# Altium footprint library DIM.PcbLib: 183 footprints (part 1 of 12)
Each footprint in its own frame and in the unit in brackets; x right, y up, seen from the top. Pads: shape width x height; smd on the part's side, far side on the other; paste and mask are expansions set on the pad; w line width, h text height; cw(c..) or ccw(c..) is an arc to the next point about the centre after c.
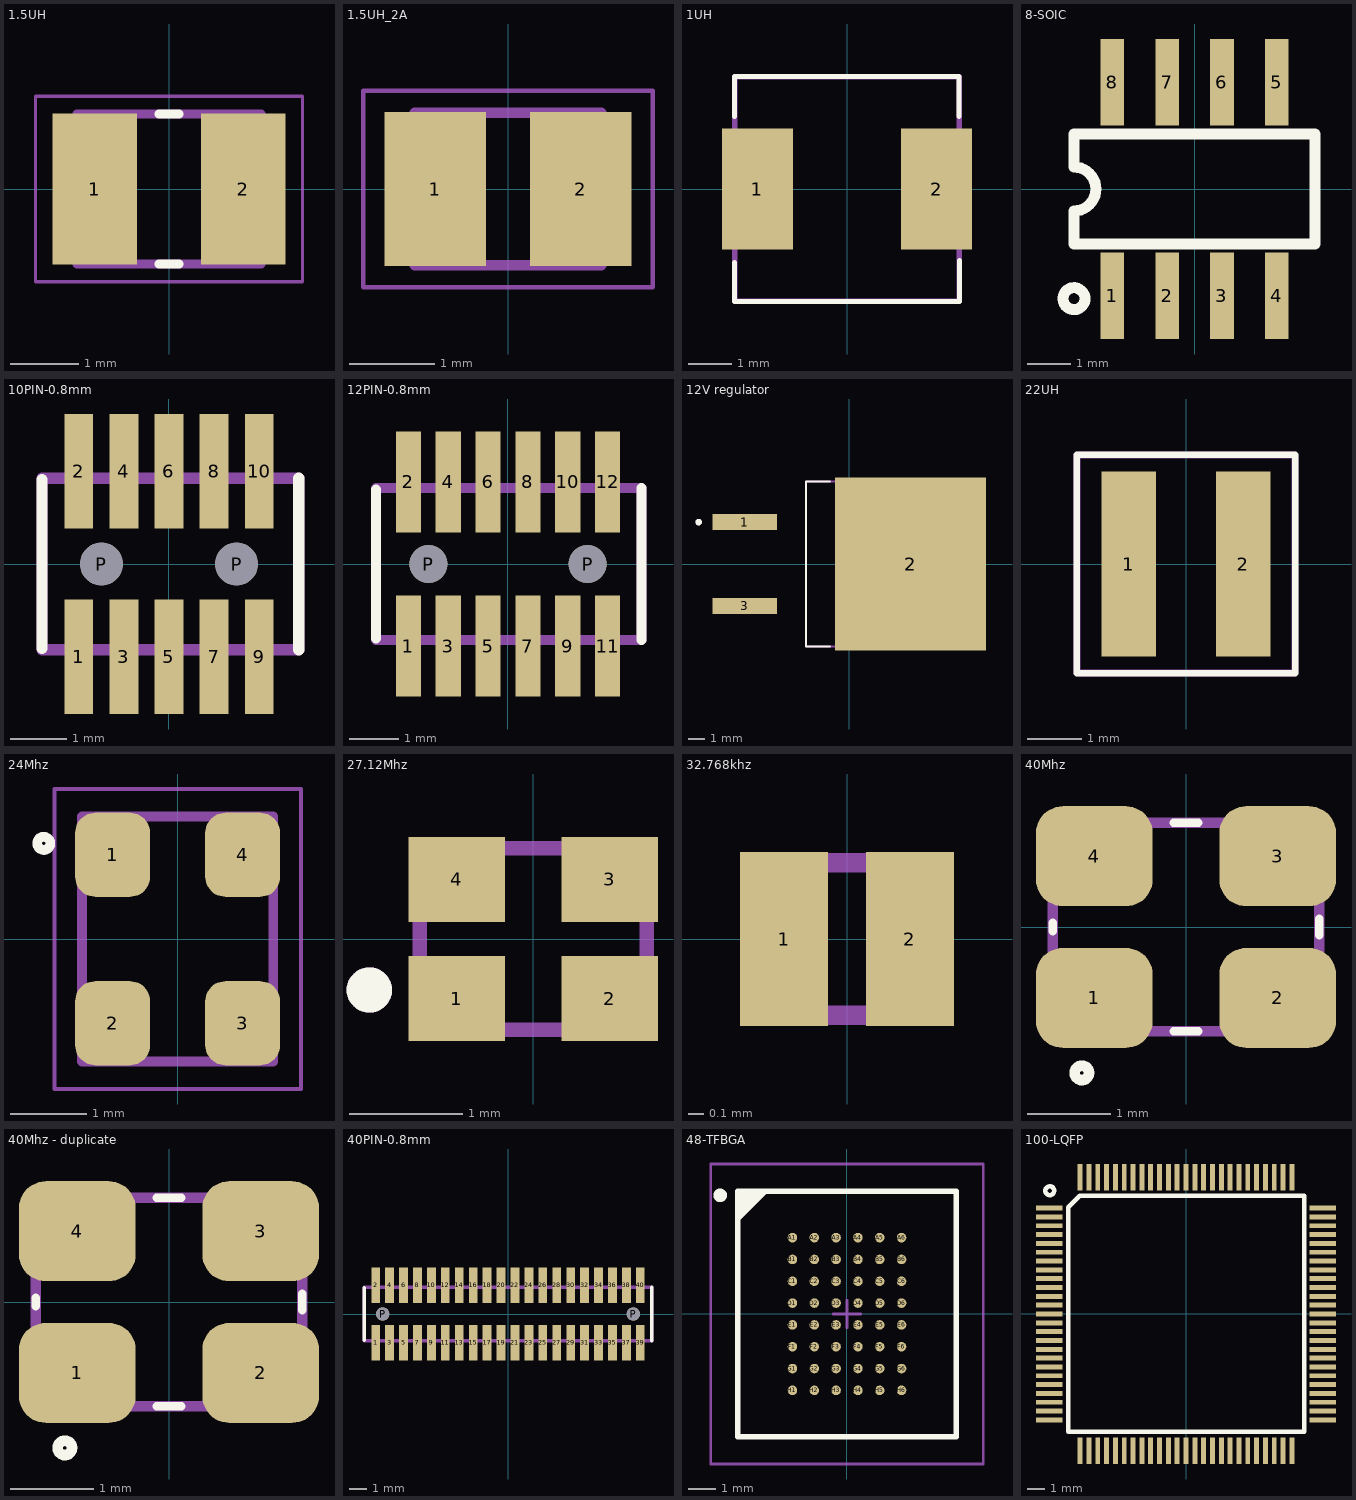
[diagram p0: the footprints below, top view; thin cyan lines are the x and y axes]

## 1.5UH [mm]
pads (2):
  rect 1.24x2.22 smd: 1(-1.09,0) 2(1.09,0)
Top Overlay:
  lines w0.127: -0.15,-1.1 0.15,-1.1 ; -0.15,1.1 0.15,1.1
Mechanical 13:
  lines w0.127: -1.35,-1.1 1.35,-1.1 1.35,1.1 -1.35,1.1 -1.35,-1.1
Mechanical 15:
  lines w0.05: -1.958,-1.358 1.958,-1.358 1.958,1.358 -1.958,1.358 -1.958,-1.358
3D body: height 1, standoff 0, extent -1.35,-1.1 1.35,1.1

## 1.5UH_2A [mm]
pads (2):
  rect 1.2x1.82 smd: 1(-0.86,0) 2(0.86,0)
Mechanical 13:
  lines w0.127: -1.1,-0.9 1.1,-0.9 1.1,0.9 -1.1,0.9 -1.1,-0.9
Mechanical 15:
  lines w0.05: -1.708,-1.158 1.708,-1.158 1.708,1.158 -1.708,1.158 -1.708,-1.158
3D body: height 1.2, standoff 0, extent -1.1,-0.9 1.1,0.9

## 1UH [mm]
pads (2):
  rect 1.65x2.8 smd: 1(-2.075,0) 2(2.075,0)
Top Overlay:
  lines w0.12: -2.603,-1.709 -2.603,-2.603 2.603,-2.603 2.603,-1.664 ; -2.603,1.676 -2.603,2.603 2.593,2.603 2.593,1.676
Mechanical 13:
  lines w0.127: -2.6,-2.6 2.6,-2.6 2.6,2.6 -2.6,2.6 -2.6,-2.6
3D body: height 1, standoff 0, extent -2.6,-2.6 2.6,2.6

## 8-SOIC [mm]
pads (8):
  rect 0.55x2 smd: 1(-1.905,-2.475) 2(-0.635,-2.475) 3(0.635,-2.475) 4(1.905,-2.475) 5(1.905,2.475) 6(0.635,2.475) 7(-0.635,2.475) 8(-1.905,2.475)
Top Overlay:
  circle w0.254: c-2.794,-2.54 r0.254
  lines w0.254: -2.794,-1.27 2.794,-1.27 2.794,1.27 -2.794,1.27 -2.794,0.508 cw(c-2.794,0) -2.286,0 cw(c-2.794,0) -2.794,-0.508 -2.794,-1.27
3D body: height 1.5, standoff 0, extent -2.794,-1.524 2.794,1.524

## 10PIN-0.8mm [mm]
pads (12):
  rect 0.508x2.03 smd: 1(-1.6,-1.65) 2(-1.6,1.65) 3(-0.8,-1.65) 4(-0.8,1.65) 5(0,-1.65) 6(0,1.65) 7(0.8,-1.65) 8(0.8,1.65) 9(1.6,-1.65) 10(1.6,1.65)
  round 0.76 hole 0.76: P(-1.2,0) P(1.2,0)
Top Overlay:
  lines w0.2: -2.255,-1.5 -2.255,1.5 ; 2.305,-1.524 2.305,1.524
Mechanical 13:
  lines w0.2: -2.255,-1.524 2.305,-1.524 2.305,1.524 -2.255,1.524 -2.255,-1.524

## 12PIN-0.8mm [mm]
pads (14):
  rect 0.508x2.03 smd: 1(-2,-1.65) 2(-2,1.65) 3(-1.2,-1.65) 4(-1.2,1.65) 5(-0.4,-1.65) 6(-0.4,1.65) 7(0.4,-1.65) 8(0.4,1.65) 9(1.2,-1.65) 10(1.2,1.65) 11(2,-1.65) 12(2,1.65)
  round 0.76 hole 0.76: P(-1.6,0) P(1.6,0)
Top Overlay:
  lines w0.2: -2.655,-1.5 -2.655,1.5 ; 2.679,-1.524 2.679,1.524
Mechanical 13:
  lines w0.2: -2.655,-1.524 2.679,-1.524 2.679,1.524 -2.655,1.524 -2.655,-1.524

## 12V regulator [mm]
pads (3):
  rect 3.93x0.97 smd: 1(-6.33,2.54) 3(-6.33,-2.54)
  rect 9.15x10.46 smd: 2(3.72,0)
Top Overlay:
  circle w0.2: c-9.125,2.54 r0.1
  lines w0.127: -1.18,-4.99 -2.628,-4.99 -2.628,4.99 -1.18,4.99
Top Paste:
  region: -0.57,3.26 0.69,3.26 0.69,1.99 -0.57,1.99
  region: 1.26,3.26 2.52,3.26 2.52,1.99 1.26,1.99
  region: 6.75,3.26 8.01,3.26 8.01,1.99 6.75,1.99
  region: 4.92,3.26 6.18,3.26 6.18,1.99 4.92,1.99
  region: 3.09,3.26 4.35,3.26 4.35,1.99 3.09,1.99
  region: -0.57,5.01 0.69,5.01 0.69,3.74 -0.57,3.74
  region: 1.26,5.01 2.52,5.01 2.52,3.74 1.26,3.74
  region: 6.75,5.01 8.01,5.01 8.01,3.74 6.75,3.74
  region: 4.92,5.01 6.18,5.01 6.18,3.74 4.92,3.74
  region: 3.09,5.01 4.35,5.01 4.35,3.74 3.09,3.74
  region: -0.57,-3.74 0.69,-3.74 0.69,-5.01 -0.57,-5.01
  region: 1.26,-3.74 2.52,-3.74 2.52,-5.01 1.26,-5.01
  region: 6.75,-3.74 8.01,-3.74 8.01,-5.01 6.75,-5.01
  region: 4.92,-3.74 6.18,-3.74 6.18,-5.01 4.92,-5.01
  region: 3.09,-3.74 4.35,-3.74 4.35,-5.01 3.09,-5.01
  region: -0.57,-1.99 0.69,-1.99 0.69,-3.26 -0.57,-3.26
  region: 1.26,-1.99 2.52,-1.99 2.52,-3.26 1.26,-3.26
  region: 6.75,-1.99 8.01,-1.99 8.01,-3.26 6.75,-3.26
  region: 4.92,-1.99 6.18,-1.99 6.18,-3.26 4.92,-3.26
  region: 3.09,-1.99 4.35,-1.99 4.35,-3.26 3.09,-3.26
  region: -0.57,-0.24 0.69,-0.24 0.69,-1.51 -0.57,-1.51
  region: 1.26,-0.24 2.52,-0.24 2.52,-1.51 1.26,-1.51
  region: 6.75,-0.24 8.01,-0.24 8.01,-1.51 6.75,-1.51
  region: 4.92,-0.24 6.18,-0.24 6.18,-1.51 4.92,-1.51
  region: 3.09,-0.24 4.35,-0.24 4.35,-1.51 3.09,-1.51
  region: -0.57,1.51 0.69,1.51 0.69,0.24 -0.57,0.24
  region: 1.26,1.51 2.52,1.51 2.52,0.24 1.26,0.24
  region: 6.75,1.51 8.01,1.51 8.01,0.24 6.75,0.24
  region: 4.92,1.51 6.18,1.51 6.18,0.24 4.92,0.24
  region: 3.09,1.51 4.35,1.51 4.35,0.24 3.09,0.24
Mechanical 4:
  circle w0.2: c-9.125,2.54 r0.1
  circle w0.2: c-9.125,2.54 r0.1
  lines w0.127: -2.628,-4.99 -2.628,4.99 ; -2.628,-4.99 6.517,-4.99 ; -2.628,-4.99 -2.628,4.99 ; -2.628,-4.99 6.517,-4.99 ; -2.628,4.99 6.517,4.99 ; -2.628,4.99 6.517,4.99 ; 6.517,-4.99 6.517,4.99 ; 6.517,-4.99 6.517,4.99

## 22UH [mm]
pads (2):
  rect 1x3.4 smd: 1(-1.05,0) 2(1.05,0)
Top Overlay:
  lines w0.12: -2,-2 -2,2 2,2 2,-2 -2,-2
Mechanical 13:
  lines w0.127: -2,-2 -2,2 2,2 2,-2 -2,-2
3D body: height 1.1, standoff 0, extent -1.674,-1.659 1.681,1.666

## 24Mhz [mm]
pads (4):
  rrect53% 0.98x1.1 smd: 1(-0.85,1.1) 2(-0.85,-1.1) 3(0.85,-1.1) 4(0.85,1.1)
Top Overlay:
  circle w0.127: c-1.75,1.25 r0.086
Mechanical 13:
  lines w0.127: -1.25,-1.6 1.25,-1.6 1.25,1.6 -1.25,1.6 -1.25,-1.6
Mechanical 15:
  lines w0.05: -1.61,-1.96 1.61,-1.96 1.61,1.96 -1.61,1.96 -1.61,-1.96

## 27.12Mhz [mm]
pads (4):
  rect 0.85x0.75 smd: 1(-0.675,-0.525) 2(0.675,-0.525) 3(0.675,0.525) 4(-0.675,0.525)
Top Overlay:
  circle w0.2: c-1.446,-0.45 r0.1
Mechanical 13:
  circle w0.2: c-1.446,-0.45 r0.1
  lines w0.127: -1,-0.8 1,-0.8 1,0.8 -1,0.8 -1,-0.8
3D body "step_temp.STEP": height 0.55, standoff 0, extent -1,-0.8 1,0.8

## 32.768khz [mm]
pads (2):
  rect 0.575x1.14 smd: 1(-0.413,0) 2(0.413,0)
Mechanical 13:
  lines w0.127: -0.6,-0.5 -0.6,0.5 0.6,0.5 0.6,-0.5 -0.6,-0.5
3D body: height 0.3, standoff 0, extent -0.6,-0.5 0.6,0.5

## 40Mhz [mm]
pads (4):
  rrect53% 1.4x1.2 smd: 1(-1.1,-0.85) 2(1.1,-0.85) 3(1.1,0.85) 4(-1.1,0.85)
Top Overlay:
  circle w0.127: c-1.25,-1.75 r0.086
  lines w0.1: -1.6,-0.05 -1.6,0.05 ; -0.15,-1.25 0.15,-1.25 ; -0.15,1.25 0.15,1.25 ; 1.6,-0.1 1.6,0.1
Mechanical 13:
  lines w0.127: -1.6,-1.25 -1.6,1.25 1.6,1.25 1.6,-1.25 -1.6,-1.25
3D body: height 0.7, standoff 0, extent -1.6,-1.25 1.6,1.25

## 40Mhz - duplicate [mm]
pads (4):
  rrect53% 1.4x1.2 smd: 1(-1.1,-0.85) 2(1.1,-0.85) 3(1.1,0.85) 4(-1.1,0.85)
Top Overlay:
  circle w0.127: c-1.25,-1.75 r0.086
  lines w0.1: -1.6,-0.05 -1.6,0.05 ; -0.15,-1.25 0.15,-1.25 ; -0.15,1.25 0.15,1.25 ; 1.6,-0.1 1.6,0.1
Mechanical 13:
  lines w0.127: -1.6,-1.25 -1.6,1.25 1.6,1.25 1.6,-1.25 -1.6,-1.25
3D body: height 0.7, standoff 0, extent -1.6,-1.25 1.6,1.25

## 40PIN-0.8mm [mm]
pads (42):
  rect 0.508x2.03 smd: 1(-7.6,-1.65) 2(-7.6,1.65) 3(-6.8,-1.65) 4(-6.8,1.65) 5(-6,-1.65) 6(-6,1.65) 7(-5.2,-1.65) 8(-5.2,1.65) 9(-4.4,-1.65) 10(-4.4,1.65) 11(-3.6,-1.65) 12(-3.6,1.65) 13(-2.8,-1.65) 14(-2.8,1.65) 15(-2,-1.65) 16(-2,1.65) 17(-1.2,-1.65) 18(-1.2,1.65) 19(-0.4,-1.65) 20(-0.4,1.65) 21(0.4,-1.65) 22(0.4,1.65) 23(1.2,-1.65) 24(1.2,1.65) 25(2,-1.65) 26(2,1.65) 27(2.8,-1.65) 28(2.8,1.65) 29(3.6,-1.65) 30(3.6,1.65) 31(4.4,-1.65) 32(4.4,1.65) 33(5.2,-1.65) 34(5.2,1.65) 35(6,-1.65) 36(6,1.65) 37(6.8,-1.65) 38(6.8,1.65) 39(7.6,-1.65) 40(7.6,1.65)
  round 0.76 hole 0.76: P(-7.2,0) P(7.2,0)
Top Overlay:
  lines w0.2: -8.255,-1.5 -8.255,1.5 ; 8.255,-1.524 8.255,1.524
Mechanical 13:
  lines w0.2: -8.255,-1.524 8.255,-1.524 8.255,1.524 -8.255,1.524 -8.255,-1.524

## 48-TFBGA [mm] "BGA, 48-Leads, Body 9x8mm, Pitch 0.8mm"
height 1.2
pads (48):
  round 0.35 smd: A1(-2,2.8) A2(-1.2,2.8) A3(-0.4,2.8) A4(0.4,2.8) A5(1.2,2.8) A6(2,2.8) B1(-2,2) B2(-1.2,2) B3(-0.4,2) B4(0.4,2) B5(1.2,2) B6(2,2) C1(-2,1.2) C2(-1.2,1.2) C3(-0.4,1.2) C4(0.4,1.2) C5(1.2,1.2) C6(2,1.2) D1(-2,0.4) D2(-1.2,0.4) D3(-0.4,0.4) D4(0.4,0.4) D5(1.2,0.4) D6(2,0.4) E1(-2,-0.4) E2(-1.2,-0.4) E3(-0.4,-0.4) E4(0.4,-0.4) E5(1.2,-0.4) E6(2,-0.4) F1(-2,-1.2) F2(-1.2,-1.2) F3(-0.4,-1.2) F4(0.4,-1.2) F5(1.2,-1.2) F6(2,-1.2) G1(-2,-2) G2(-1.2,-2) G3(-0.4,-2) G4(0.4,-2) G5(1.2,-2) G6(2,-2) H1(-2,-2.8) H2(-1.2,-2.8) H3(-0.4,-2.8) H4(0.4,-2.8) H5(1.2,-2.8) H6(2,-2.8)
Top Overlay:
  circle w0.25: c-4.65,4.35 r0.125
  region: -3,4.5 -4,3.5 -4,4.5
  lines w0.2: -4,3.5 -3,4.5 ; -4,-4.5 -4,4.5 4,4.5 4,-4.5 -4,-4.5
Mechanical 13:
  lines w0.1: -4,-4.5 -4,4.5 4,4.5 4,-4.5 -4,-4.5
Mechanical 15:
  lines w0.1: -0.5,0 0.5,0 ; 0,-0.5 0,0.5 ; -5,-5.5 -5,5.5 5,5.5 5,-5.5 -5,-5.5
3D body: height 1.2, standoff 0, extent -4,-4.5 4,4.5

## 100-LQFP [mm]
pads (100):
  rect 1.5x0.28 smd: 1(-7.75,6) 2(-7.75,5.5) 3(-7.75,5) 4(-7.75,4.5) 5(-7.75,4) 6(-7.75,3.5) 7(-7.75,3) 8(-7.75,2.5) 9(-7.75,2) 10(-7.75,1.5) 11(-7.75,1) 12(-7.75,0.5) 13(-7.75,0) 14(-7.75,-0.5) 15(-7.75,-1) 16(-7.75,-1.5) 17(-7.75,-2) 18(-7.75,-2.5) 19(-7.75,-3) 20(-7.75,-3.5) 21(-7.75,-4) 22(-7.75,-4.5) 23(-7.75,-5) 24(-7.75,-5.5) 25(-7.75,-6) 51(7.75,-6) 52(7.75,-5.5) 53(7.75,-5) 54(7.75,-4.5) 55(7.75,-4) 56(7.75,-3.5) 57(7.75,-3) 58(7.75,-2.5) 59(7.75,-2) 60(7.75,-1.5) 61(7.75,-1) 62(7.75,-0.5) 63(7.75,0) 64(7.75,0.5) 65(7.75,1) 66(7.75,1.5) 67(7.75,2) 68(7.75,2.5) 69(7.75,3) 70(7.75,3.5) 71(7.75,4) 72(7.75,4.5) 73(7.75,5) 74(7.75,5.5) 75(7.75,6)
  rect 0.28x1.5 smd: 26(-6,-7.75) 27(-5.5,-7.75) 28(-5,-7.75) 29(-4.5,-7.75) 30(-4,-7.75) 31(-3.5,-7.75) 32(-3,-7.75) 33(-2.5,-7.75) 34(-2,-7.75) 35(-1.5,-7.75) 36(-1,-7.75) 37(-0.5,-7.75) 38(0,-7.75) 39(0.5,-7.75) 40(1,-7.75) 41(1.5,-7.75) 42(2,-7.75) 43(2.5,-7.75) 44(3,-7.75) 45(3.5,-7.75) 46(4,-7.75) 47(4.5,-7.75) 48(5,-7.75) 49(5.5,-7.75) 50(6,-7.75) 76(6,7.75) 77(5.5,7.75) 78(5,7.75) 79(4.5,7.75) 80(4,7.75) 81(3.5,7.75) 82(3,7.75) 83(2.5,7.75) 84(2,7.75) 85(1.5,7.75) 86(1,7.75) 87(0.5,7.75) 88(0,7.75) 89(-0.5,7.75) 90(-1,7.75) 91(-1.5,7.75) 92(-2,7.75) 93(-2.5,7.75) 94(-3,7.75) 95(-3.5,7.75) 96(-4,7.75) 97(-4.5,7.75) 98(-5,7.75) 99(-5.5,7.75) 100(-6,7.75)
Top Overlay:
  circle w0.254: c-7.722,6.985 r0.25
  lines w0.254: -6.68,-6.68 -6.68,6.045 -6.02,6.706 6.706,6.706 6.706,-6.68 -6.68,-6.68
3D body: height 1.5, standoff 0, extent -7.112,-7.112 7.112,7.112